# Altium footprint library FootPrintLib_7.PcbLib: 358 footprints (part 19 of 24)
Each footprint in its own frame and in the unit in brackets; x right, y up, seen from the top. Pads: shape width x height; smd on the part's side, far side on the other; paste and mask are expansions set on the pad; w line width, h text height; cw(c..) or ccw(c..) is an arc to the next point about the centre after c.
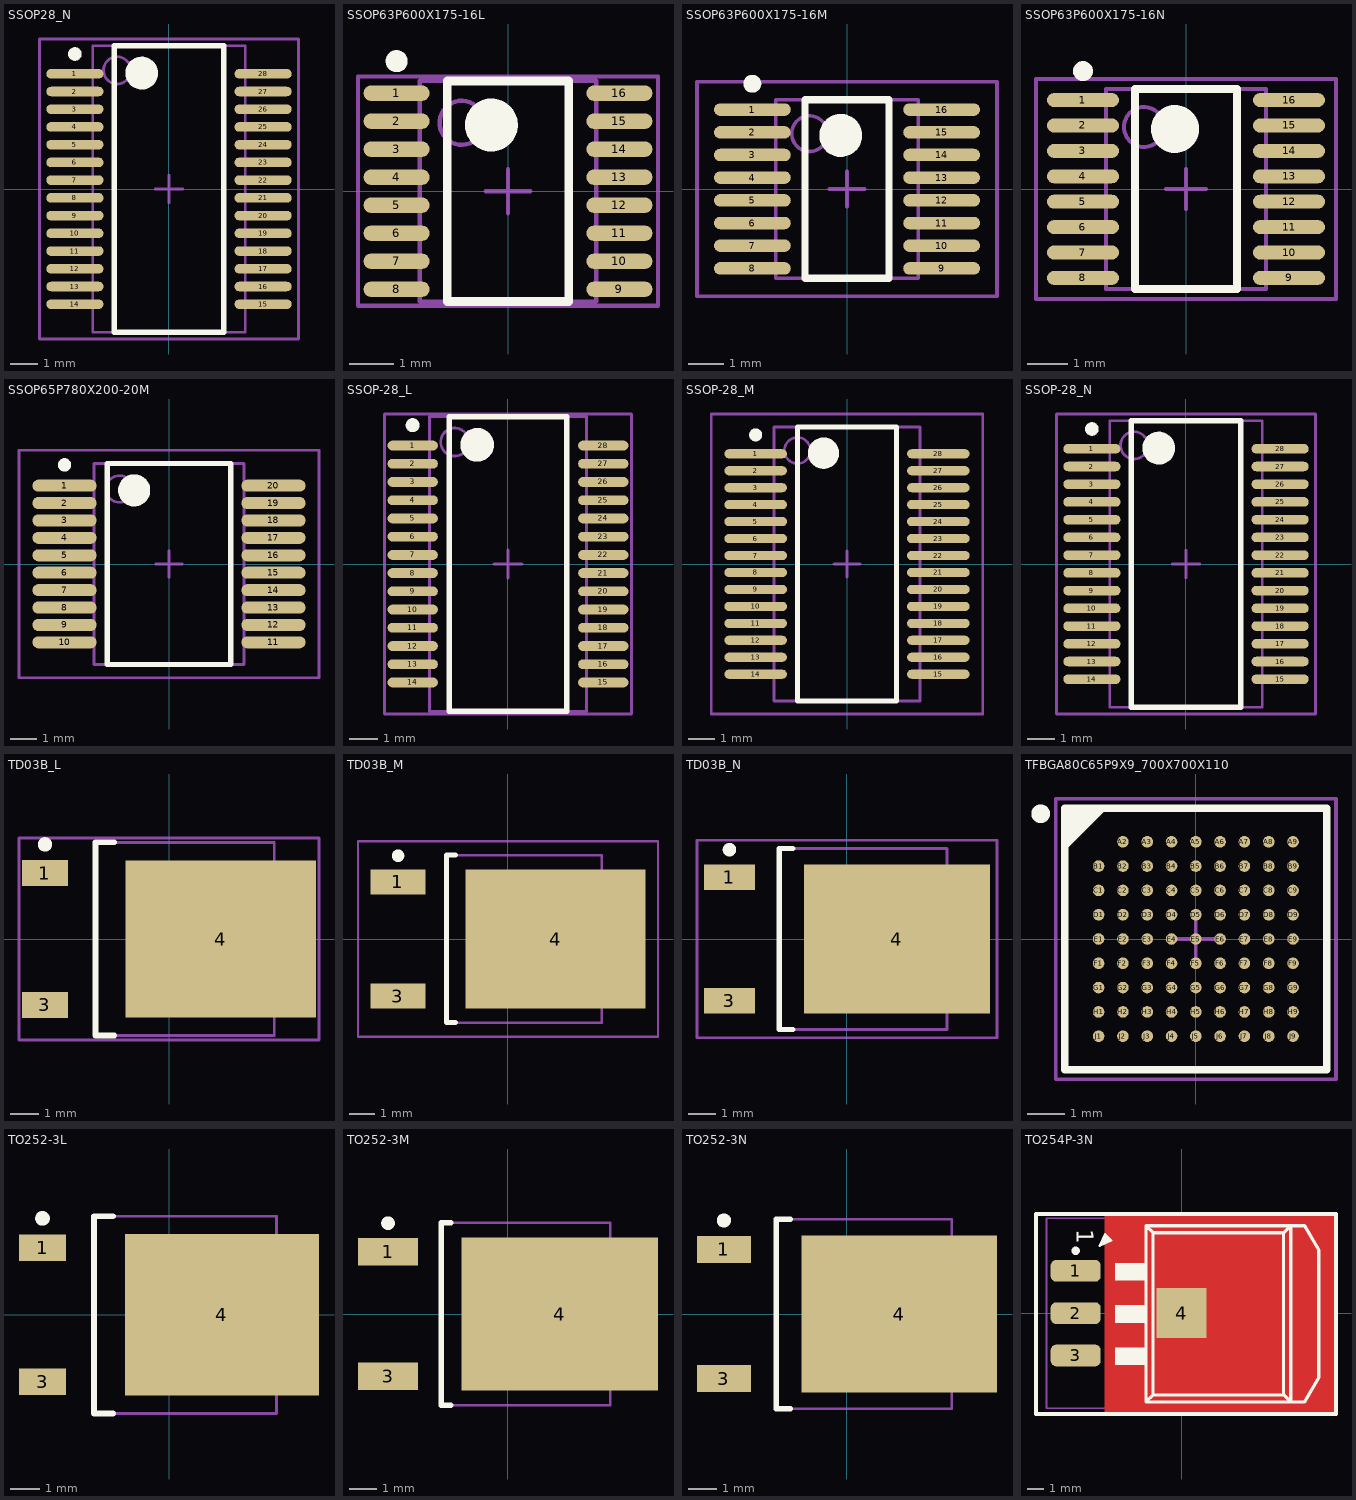
[diagram p18: the footprints below, top view; thin cyan lines are the x and y axes]

## SSOP28_N [mm] "SSOP, 28-Leads, Body 10.2x5.3mm, Pitch 0.65mm, IPC Medium Density"
height 2
pads (28):
  oval 2.1x0.35 smd: 1(-3.45,4.225) 2(-3.45,3.575) 3(-3.45,2.925) 4(-3.45,2.275) 5(-3.45,1.625) 6(-3.45,0.975) 7(-3.45,0.325) 8(-3.45,-0.325) 9(-3.45,-0.975) 10(-3.45,-1.625) 11(-3.45,-2.275) 12(-3.45,-2.925) 13(-3.45,-3.575) 14(-3.45,-4.225) 15(3.45,-4.225) 16(3.45,-3.575) 17(3.45,-2.925) 18(3.45,-2.275) 19(3.45,-1.625) 20(3.45,-0.975) 21(3.45,-0.325) 22(3.45,0.325) 23(3.45,0.975) 24(3.45,1.625) 25(3.45,2.275) 26(3.45,2.925) 27(3.45,3.575) 28(3.45,4.225)
Top Overlay:
  circle w0.6: c-1,4.25 r0.3
  circle w0.25: c-3.45,4.95 r0.125
  lines w0.2: -2,-5.25 2,-5.25 2,5.25 -2,5.25 -2,-5.25
Mechanical 13:
  circle w0.1: c-1.9,4.35 r0.5
  lines w0.1: -2.8,-5.25 2.8,-5.25 2.8,5.25 -2.8,5.25 -2.8,-5.25
Mechanical 15:
  lines w0.1: -0.5,0 0.5,0 ; 0,-0.5 0,0.5 ; -4.75,-5.5 4.75,-5.5 4.75,5.5 -4.75,5.5 -4.75,-5.5
3D body "User Library-SSOP-28-FT232RL.step": height 2.16, standoff 0, extent -3.878,-5.165 3.878,5.165

## SSOP63P600X175-16L [mm] "SSOP, 16-Leads, Body 5.0x4.0mm (max), Pitch 0.63mm, IPC High Density"
height 1.75
pads (16):
  oval 1.5x0.35 smd: 1(-2.525,2.222) 2(-2.525,1.587) 3(-2.525,0.953) 4(-2.525,0.318) 5(-2.525,-0.318) 6(-2.525,-0.953) 7(-2.525,-1.587) 8(-2.525,-2.222) 9(2.525,-2.222) 10(2.525,-1.587) 11(2.525,-0.953) 12(2.525,-0.318) 13(2.525,0.318) 14(2.525,0.953) 15(2.525,1.587) 16(2.525,2.222)
Top Overlay:
  circle w0.25: c-2.525,2.947 r0.125
  circle w0.6: c-0.375,1.5 r0.3
  lines w0.2: -1.375,-2.5 -1.375,2.5 1.375,2.5 1.375,-2.5 -1.375,-2.5
Mechanical 13:
  circle w0.1: c-1.05,1.55 r0.5
  lines w0.1: -2,-2.5 -2,2.5 2,2.5 2,-2.5 -2,-2.5
Mechanical 15:
  lines w0.1: -0.5,0 0.5,0 ; 0,-0.5 0,0.5 ; -3.4,-2.6 -3.4,2.6 3.4,2.6 3.4,-2.6 -3.4,-2.6
3D body: height 1.75, standoff 0.1, extent -2,-2.5 2,2.5

## SSOP63P600X175-16M [mm] "SSOP, 16-Leads, Body 5.0x4.0mm (max), Pitch 0.63mm, IPC Low Density"
height 1.75
pads (16):
  oval 2.15x0.35 smd: 1(-2.65,2.222) 2(-2.65,1.587) 3(-2.65,0.953) 4(-2.65,0.318) 5(-2.65,-0.318) 6(-2.65,-0.953) 7(-2.65,-1.587) 8(-2.65,-2.222) 9(2.65,-2.222) 10(2.65,-1.587) 11(2.65,-0.953) 12(2.65,-0.318) 13(2.65,0.318) 14(2.65,0.953) 15(2.65,1.587) 16(2.65,2.222)
Top Overlay:
  circle w0.6: c-0.175,1.5 r0.3
  circle w0.25: c-2.65,2.947 r0.125
  lines w0.2: -1.175,-2.5 1.175,-2.5 1.175,2.5 -1.175,2.5 -1.175,-2.5
Mechanical 13:
  circle w0.1: c-1.05,1.55 r0.5
  lines w0.1: -2,-2.5 2,-2.5 2,2.5 -2,2.5 -2,-2.5
Mechanical 15:
  lines w0.1: -0.5,0 0.5,0 ; 0,-0.5 0,0.5 ; -4.2,-3 4.2,-3 4.2,3 -4.2,3 -4.2,-3
3D body: height 1.75, standoff 0.1, extent -2,-2.5 2,2.5

## SSOP63P600X175-16N [mm] "SSOP, 16-Leads, Body 5.0x4.0mm (max), Pitch 0.63mm, IPC Medium Density"
height 1.75
pads (16):
  oval 1.8x0.35 smd: 1(-2.575,2.222) 2(-2.575,1.587) 3(-2.575,0.953) 4(-2.575,0.318) 5(-2.575,-0.318) 6(-2.575,-0.953) 7(-2.575,-1.587) 8(-2.575,-2.222) 9(2.575,-2.222) 10(2.575,-1.587) 11(2.575,-0.953) 12(2.575,-0.318) 13(2.575,0.318) 14(2.575,0.953) 15(2.575,1.587) 16(2.575,2.222)
Top Overlay:
  circle w0.6: c-0.275,1.5 r0.3
  circle w0.25: c-2.575,2.947 r0.125
  lines w0.2: -1.275,-2.5 1.275,-2.5 1.275,2.5 -1.275,2.5 -1.275,-2.5
Mechanical 13:
  circle w0.1: c-1.05,1.55 r0.5
  lines w0.1: -2,-2.5 2,-2.5 2,2.5 -2,2.5 -2,-2.5
Mechanical 15:
  lines w0.1: -0.5,0 0.5,0 ; 0,-0.5 0,0.5 ; -3.75,-2.75 3.75,-2.75 3.75,2.75 -3.75,2.75 -3.75,-2.75
3D body: height 1.75, standoff 0.1, extent -2,-2.5 2,2.5

## SSOP65P780X200-20M [mm] "SOP, 20-Leads, Body 7.5x5.6mm (max), Pitch 0.65mm, IPC Low Density"
height 2
pads (20):
  oval 2.4x0.45 smd: 1(-3.9,2.925) 2(-3.9,2.275) 3(-3.9,1.625) 4(-3.9,0.975) 5(-3.9,0.325) 6(-3.9,-0.325) 7(-3.9,-0.975) 8(-3.9,-1.625) 9(-3.9,-2.275) 10(-3.9,-2.925) 11(3.9,-2.925) 12(3.9,-2.275) 13(3.9,-1.625) 14(3.9,-0.975) 15(3.9,-0.325) 16(3.9,0.325) 17(3.9,0.975) 18(3.9,1.625) 19(3.9,2.275) 20(3.9,2.925)
Top Overlay:
  circle w0.6: c-1.3,2.75 r0.3
  circle w0.25: c-3.9,3.7 r0.125
  lines w0.2: -2.3,-3.75 2.3,-3.75 2.3,3.75 -2.3,3.75 -2.3,-3.75
Mechanical 13:
  circle w0.1: c-1.85,2.8 r0.5
  lines w0.1: -2.8,-3.75 2.8,-3.75 2.8,3.75 -2.8,3.75 -2.8,-3.75
Mechanical 15:
  lines w0.1: -0.5,0 0.5,0 ; 0,-0.5 0,0.5 ; -5.6,-4.25 5.6,-4.25 5.6,4.25 -5.6,4.25 -5.6,-4.25
3D body "User Library-SSOP 20 PIN.step": height 1.93, standoff -0.06, extent -3.95,-3.25 3.95,3.25

## SSOP-28_L [mm] "SOP, 28-Leads, Body 10.2x5.3mm, Pitch 0.65mm, IPC High Density"
height 2
pads (28):
  oval 1.8x0.35 smd: 1(-3.4,4.225) 2(-3.4,3.575) 3(-3.4,2.925) 4(-3.4,2.275) 5(-3.4,1.625) 6(-3.4,0.975) 7(-3.4,0.325) 8(-3.4,-0.325) 9(-3.4,-0.975) 10(-3.4,-1.625) 11(-3.4,-2.275) 12(-3.4,-2.925) 13(-3.4,-3.575) 14(-3.4,-4.225) 15(3.4,-4.225) 16(3.4,-3.575) 17(3.4,-2.925) 18(3.4,-2.275) 19(3.4,-1.625) 20(3.4,-0.975) 21(3.4,-0.325) 22(3.4,0.325) 23(3.4,0.975) 24(3.4,1.625) 25(3.4,2.275) 26(3.4,2.925) 27(3.4,3.575) 28(3.4,4.225)
Top Overlay:
  circle w0.25: c-3.4,4.95 r0.125
  circle w0.6: c-1.1,4.25 r0.3
  lines w0.2: -2.1,-5.25 -2.1,5.25 2.1,5.25 2.1,-5.25 -2.1,-5.25
Mechanical 13:
  circle w0.1: c-1.9,4.35 r0.5
  lines w0.1: -2.8,-5.25 -2.8,5.25 2.8,5.25 2.8,-5.25 -2.8,-5.25
Mechanical 15:
  lines w0.1: -0.5,0 0.5,0 ; 0,-0.5 0,0.5 ; -4.4,-5.35 -4.4,5.35 4.4,5.35 4.4,-5.35 -4.4,-5.35
3D body "User Library-SSOP-28-FT232RL.step": height 2.16, standoff 0, extent -3.878,-5.165 3.878,5.165

## SSOP-28_M [mm] "SOP, 28-Leads, Body 10.2x5.3mm, Pitch 0.65mm, IPC Low Density"
height 2
pads (28):
  oval 2.4x0.35 smd: 1(-3.5,4.225) 2(-3.5,3.575) 3(-3.5,2.925) 4(-3.5,2.275) 5(-3.5,1.625) 6(-3.5,0.975) 7(-3.5,0.325) 8(-3.5,-0.325) 9(-3.5,-0.975) 10(-3.5,-1.625) 11(-3.5,-2.275) 12(-3.5,-2.925) 13(-3.5,-3.575) 14(-3.5,-4.225) 15(3.5,-4.225) 16(3.5,-3.575) 17(3.5,-2.925) 18(3.5,-2.275) 19(3.5,-1.625) 20(3.5,-0.975) 21(3.5,-0.325) 22(3.5,0.325) 23(3.5,0.975) 24(3.5,1.625) 25(3.5,2.275) 26(3.5,2.925) 27(3.5,3.575) 28(3.5,4.225)
Top Overlay:
  circle w0.25: c-3.5,4.95 r0.125
  circle w0.6: c-0.9,4.25 r0.3
  lines w0.2: -1.9,-5.25 -1.9,5.25 1.9,5.25 1.9,-5.25 -1.9,-5.25
Mechanical 13:
  circle w0.1: c-1.9,4.35 r0.5
  lines w0.1: -2.8,-5.25 -2.8,5.25 2.8,5.25 2.8,-5.25 -2.8,-5.25
Mechanical 15:
  lines w0.1: -0.5,0 0.5,0 ; 0,-0.5 0,0.5 ; -5.2,-5.75 -5.2,5.75 5.2,5.75 5.2,-5.75 -5.2,-5.75
3D body "User Library-SSOP-28-FT232RL.step": height 2.16, standoff 0, extent -3.878,-5.165 3.878,5.165

## SSOP-28_N [mm] "SOP, 28-Leads, Body 10.2x5.3mm, Pitch 0.65mm, IPC Medium Density"
height 2
pads (28):
  oval 2.1x0.35 smd: 1(-3.45,4.225) 2(-3.45,3.575) 3(-3.45,2.925) 4(-3.45,2.275) 5(-3.45,1.625) 6(-3.45,0.975) 7(-3.45,0.325) 8(-3.45,-0.325) 9(-3.45,-0.975) 10(-3.45,-1.625) 11(-3.45,-2.275) 12(-3.45,-2.925) 13(-3.45,-3.575) 14(-3.45,-4.225) 15(3.45,-4.225) 16(3.45,-3.575) 17(3.45,-2.925) 18(3.45,-2.275) 19(3.45,-1.625) 20(3.45,-0.975) 21(3.45,-0.325) 22(3.45,0.325) 23(3.45,0.975) 24(3.45,1.625) 25(3.45,2.275) 26(3.45,2.925) 27(3.45,3.575) 28(3.45,4.225)
Top Overlay:
  circle w0.6: c-1,4.25 r0.3
  circle w0.25: c-3.45,4.95 r0.125
  lines w0.2: -2,-5.25 2,-5.25 2,5.25 -2,5.25 -2,-5.25
Mechanical 13:
  circle w0.1: c-1.9,4.35 r0.5
  lines w0.1: -2.8,-5.25 2.8,-5.25 2.8,5.25 -2.8,5.25 -2.8,-5.25
Mechanical 15:
  lines w0.1: -0.5,0 0.5,0 ; 0,-0.5 0,0.5 ; -4.75,-5.5 4.75,-5.5 4.75,5.5 -4.75,5.5 -4.75,-5.5
3D body "User Library-SSOP-28-FT232RL.step": height 2.16, standoff 0, extent -3.878,-5.165 3.878,5.165

## TD03B_L [mm] "D-PAK, 4-Leads, Body 6.1x6.6mm, Pitch 2.29mm, Lead Span 9.7mm, IPC High Density"
height 2.38
pads (3):
  rect 1.6x0.9 smd: 1(-4.3,2.28) 3(-4.3,-2.28)
  rect 6.6x5.45 smd: 4(1.8,0)
Top Overlay:
  circle w0.25: c-4.3,3.28 r0.125
  lines w0.2: -1.9,-3.35 -2.55,-3.35 -2.55,3.35 -1.9,3.35
Mechanical 13:
  lines w0.1: -2.55,-3.35 3.65,-3.35 3.65,3.35 -2.55,3.35 -2.55,-3.35
Mechanical 15:
  lines w0.1: -0.5,0 0.5,0 ; 0,-0.5 0,0.5 ; -5.2,-3.5 5.2,-3.5 5.2,3.5 -5.2,3.5 -5.2,-3.5
3D body "DPAK.STEP": height 2.34, standoff -0.07, extent -5.176,-3.27 4.762,3.27

## TD03B_M [mm] "D-PAK, 4-Leads, Body 6.1x6.6mm, Pitch 2.29mm, Lead Span 9.7mm, IPC Low Density"
height 2.38
pads (3):
  rect 2.2x1 smd: 1(-4.4,2.28) 3(-4.4,-2.28)
  rect 7.2x5.55 smd: 4(1.9,0)
Top Overlay:
  circle w0.25: c-4.4,3.33 r0.125
  lines w0.2: -2.1,-3.35 -2.45,-3.35 -2.45,3.35 -2.1,3.35
Mechanical 13:
  lines w0.1: -2.45,-3.35 3.75,-3.35 3.75,3.35 -2.45,3.35 -2.45,-3.35
Mechanical 15:
  lines w0.1: -0.5,0 0.5,0 ; 0,-0.5 0,0.5 ; -6,-3.9 6,-3.9 6,3.9 -6,3.9 -6,-3.9
3D body "DPAK.STEP": height 2.34, standoff -0.07, extent -5.176,-3.27 4.762,3.27

## TD03B_N [mm] "D-PAK, 4-Leads, Body 6.1x6.6mm, Pitch 2.29mm, Lead Span 9.7mm, IPC Medium Density"
height 2.38
pads (3):
  rect 1.9x0.95 smd: 1(-4.35,2.28) 3(-4.35,-2.28)
  rect 6.9x5.5 smd: 4(1.85,0)
Top Overlay:
  circle w0.25: c-4.35,3.305 r0.125
  lines w0.2: -2,-3.35 -2.5,-3.35 -2.5,3.35 -2,3.35
Mechanical 13:
  lines w0.1: -2.5,-3.35 3.7,-3.35 3.7,3.35 -2.5,3.35 -2.5,-3.35
Mechanical 15:
  lines w0.1: -0.5,0 0.5,0 ; 0,-0.5 0,0.5 ; -5.55,-3.65 5.55,-3.65 5.55,3.65 -5.55,3.65 -5.55,-3.65
3D body "DPAK.STEP": height 2.34, standoff -0.07, extent -5.176,-3.27 4.762,3.27

## TFBGA80C65P9X9_700X700X110 [mm] "TFBGA, 80-Leads, Body 7.0x7.0mm,  Pitch 0.65mm"
height 1.1
pads (80):
  round 0.31 smd: A2(-1.95,2.6) A3(-1.3,2.6) A4(-0.65,2.6) A5(0,2.6) A6(0.65,2.6) A7(1.3,2.6) A8(1.95,2.6) A9(2.6,2.6) B1(-2.6,1.95) B2(-1.95,1.95) B3(-1.3,1.95) B4(-0.65,1.95) B5(0,1.95) B6(0.65,1.95) B7(1.3,1.95) B8(1.95,1.95) B9(2.6,1.95) C1(-2.6,1.3) C2(-1.95,1.3) C3(-1.3,1.3) C4(-0.65,1.3) C5(0,1.3) C6(0.65,1.3) C7(1.3,1.3) C8(1.95,1.3) C9(2.6,1.3) D1(-2.6,0.65) D2(-1.95,0.65) D3(-1.3,0.65) D4(-0.65,0.65) D5(0,0.65) D6(0.65,0.65) D7(1.3,0.65) D8(1.95,0.65) D9(2.6,0.65) E1(-2.6,0) E2(-1.95,0) E3(-1.3,0) E4(-0.65,0) E5(0,0) E6(0.65,0) E7(1.3,0) E8(1.95,0) E9(2.6,0) F1(-2.6,-0.65) F2(-1.95,-0.65) F3(-1.3,-0.65) F4(-0.65,-0.65) F5(0,-0.65) F6(0.65,-0.65) F7(1.3,-0.65) F8(1.95,-0.65) F9(2.6,-0.65) G1(-2.6,-1.3) G2(-1.95,-1.3) G3(-1.3,-1.3) G4(-0.65,-1.3) G5(0,-1.3) G6(0.65,-1.3) G7(1.3,-1.3) G8(1.95,-1.3) G9(2.6,-1.3) H1(-2.6,-1.95) H2(-1.95,-1.95) H3(-1.3,-1.95) H4(-0.65,-1.95) H5(0,-1.95) H6(0.65,-1.95) H7(1.3,-1.95) H8(1.95,-1.95) H9(2.6,-1.95) J1(-2.6,-2.6) J2(-1.95,-2.6) J3(-1.3,-2.6) J4(-0.65,-2.6) J5(0,-2.6) J6(0.65,-2.6) J7(1.3,-2.6) J8(1.95,-2.6) J9(2.6,-2.6)
Top Overlay:
  circle w0.25: c-4.15,3.35 r0.125
  region: -2.5,3.5 -3.5,2.5 -3.5,3.5
  lines w0.2: -3.5,2.5 -2.5,3.5 ; -3.5,-3.5 -3.5,3.5 3.5,3.5 3.5,-3.5 -3.5,-3.5
Mechanical 13:
  lines w0.1: -3.5,-3.5 -3.5,3.5 3.5,3.5 3.5,-3.5 -3.5,-3.5
Mechanical 15:
  lines w0.1: -0.5,0 0.5,0 ; 0,-0.5 0,0.5 ; -3.75,-3.75 -3.75,3.75 3.75,3.75 3.75,-3.75 -3.75,-3.75
3D body: height 1.1, standoff 0.26, extent -3.5,-3.5 3.5,3.5
3D body: height 1.11, standoff 1.1, extent -2.965,2.368 -2.367,2.966
3D body: height 0.54, standoff 0, extent -2.867,-2.869 -2.33,-2.331
3D body: height 0.54, standoff 0, extent -2.867,-2.219 -2.33,-1.681
3D body: height 0.54, standoff 0, extent -2.867,-1.569 -2.33,-1.031
3D body: height 0.54, standoff 0, extent -2.867,-0.919 -2.33,-0.381
3D body: height 0.54, standoff 0, extent -2.867,-0.269 -2.33,0.269
3D body: height 0.54, standoff 0, extent -2.867,0.381 -2.33,0.919
3D body: height 0.54, standoff 0, extent -2.867,1.031 -2.33,1.569
3D body: height 0.54, standoff 0, extent -2.867,1.681 -2.33,2.219
3D body: height 0.54, standoff 0, extent -2.217,-2.869 -1.68,-2.331
3D body: height 0.54, standoff 0, extent -2.217,-2.219 -1.68,-1.681
3D body: height 0.54, standoff 0, extent -2.217,-1.569 -1.68,-1.031
3D body: height 0.54, standoff 0, extent -2.217,-0.919 -1.68,-0.381
3D body: height 0.54, standoff 0, extent -2.217,-0.269 -1.68,0.269
3D body: height 0.54, standoff 0, extent -2.217,0.381 -1.68,0.919
3D body: height 0.54, standoff 0, extent -2.217,1.031 -1.68,1.569
3D body: height 0.54, standoff 0, extent -2.217,1.681 -1.68,2.219
3D body: height 0.54, standoff 0, extent -2.217,2.331 -1.68,2.869
3D body: height 0.54, standoff 0, extent -1.567,-2.869 -1.03,-2.331
3D body: height 0.54, standoff 0, extent -1.567,-2.219 -1.03,-1.681
3D body: height 0.54, standoff 0, extent -1.567,-1.569 -1.03,-1.031
3D body: height 0.54, standoff 0, extent -1.567,-0.919 -1.03,-0.381
3D body: height 0.54, standoff 0, extent -1.567,-0.269 -1.03,0.269
3D body: height 0.54, standoff 0, extent -1.567,0.381 -1.03,0.919
3D body: height 0.54, standoff 0, extent -1.567,1.031 -1.03,1.569
3D body: height 0.54, standoff 0, extent -1.567,1.681 -1.03,2.219
3D body: height 0.54, standoff 0, extent -1.567,2.331 -1.03,2.869
3D body: height 0.54, standoff 0, extent -0.917,-2.869 -0.38,-2.331
3D body: height 0.54, standoff 0, extent -0.917,-2.219 -0.38,-1.681
3D body: height 0.54, standoff 0, extent -0.917,-1.569 -0.38,-1.031
3D body: height 0.54, standoff 0, extent -0.917,-0.919 -0.38,-0.381
3D body: height 0.54, standoff 0, extent -0.917,-0.269 -0.38,0.269
3D body: height 0.54, standoff 0, extent -0.917,0.381 -0.38,0.919
3D body: height 0.54, standoff 0, extent -0.917,1.031 -0.38,1.569
3D body: height 0.54, standoff 0, extent -0.917,1.681 -0.38,2.219
3D body: height 0.54, standoff 0, extent -0.917,2.331 -0.38,2.869
3D body: height 0.54, standoff 0, extent -0.267,-2.869 0.27,-2.331
3D body: height 0.54, standoff 0, extent -0.267,-2.219 0.27,-1.681
3D body: height 0.54, standoff 0, extent -0.267,-1.569 0.27,-1.031
3D body: height 0.54, standoff 0, extent -0.267,-0.919 0.27,-0.381
3D body: height 0.54, standoff 0, extent -0.267,-0.269 0.27,0.269
3D body: height 0.54, standoff 0, extent -0.267,0.381 0.27,0.919
3D body: height 0.54, standoff 0, extent -0.267,1.031 0.27,1.569
3D body: height 0.54, standoff 0, extent -0.267,1.681 0.27,2.219
3D body: height 0.54, standoff 0, extent -0.267,2.331 0.27,2.869
3D body: height 0.54, standoff 0, extent 0.383,-2.869 0.92,-2.331
3D body: height 0.54, standoff 0, extent 0.383,-2.219 0.92,-1.681
3D body: height 0.54, standoff 0, extent 0.383,-1.569 0.92,-1.031
3D body: height 0.54, standoff 0, extent 0.383,-0.919 0.92,-0.381
3D body: height 0.54, standoff 0, extent 0.383,-0.269 0.92,0.269
3D body: height 0.54, standoff 0, extent 0.383,0.381 0.92,0.919
3D body: height 0.54, standoff 0, extent 0.383,1.031 0.92,1.569
3D body: height 0.54, standoff 0, extent 0.383,1.681 0.92,2.219
3D body: height 0.54, standoff 0, extent 0.383,2.331 0.92,2.869
3D body: height 0.54, standoff 0, extent 1.033,-2.869 1.57,-2.331
3D body: height 0.54, standoff 0, extent 1.033,-2.219 1.57,-1.681
3D body: height 0.54, standoff 0, extent 1.033,-1.569 1.57,-1.031
3D body: height 0.54, standoff 0, extent 1.033,-0.919 1.57,-0.381
3D body: height 0.54, standoff 0, extent 1.033,-0.269 1.57,0.269
3D body: height 0.54, standoff 0, extent 1.033,0.381 1.57,0.919
3D body: height 0.54, standoff 0, extent 1.033,1.031 1.57,1.569
3D body: height 0.54, standoff 0, extent 1.033,1.681 1.57,2.219
3D body: height 0.54, standoff 0, extent 1.033,2.331 1.57,2.869
3D body: height 0.54, standoff 0, extent 1.683,-2.869 2.22,-2.331
3D body: height 0.54, standoff 0, extent 1.683,-2.219 2.22,-1.681
3D body: height 0.54, standoff 0, extent 1.683,-1.569 2.22,-1.031
3D body: height 0.54, standoff 0, extent 1.683,-0.919 2.22,-0.381
3D body: height 0.54, standoff 0, extent 1.683,-0.269 2.22,0.269
3D body: height 0.54, standoff 0, extent 1.683,0.381 2.22,0.919
3D body: height 0.54, standoff 0, extent 1.683,1.031 2.22,1.569
3D body: height 0.54, standoff 0, extent 1.683,1.681 2.22,2.219
3D body: height 0.54, standoff 0, extent 1.683,2.331 2.22,2.869
3D body: height 0.54, standoff 0, extent 2.333,-2.869 2.87,-2.331
3D body: height 0.54, standoff 0, extent 2.333,-2.219 2.87,-1.681
3D body: height 0.54, standoff 0, extent 2.333,-1.569 2.87,-1.031
3D body: height 0.54, standoff 0, extent 2.333,-0.919 2.87,-0.381
3D body: height 0.54, standoff 0, extent 2.333,-0.269 2.87,0.269
3D body: height 0.54, standoff 0, extent 2.333,0.381 2.87,0.919
3D body: height 0.54, standoff 0, extent 2.333,1.031 2.87,1.569
3D body: height 0.54, standoff 0, extent 2.333,1.681 2.87,2.219
3D body: height 0.54, standoff 0, extent 2.333,2.331 2.87,2.869

## TO252-3L [mm] "D-PAK, 3-Pads, Body 6.2x6.7mm (max), IPC High Density"
height 2.38
pads (3):
  rect 1.6x0.9 smd: 1(-4.3,2.28) 3(-4.3,-2.28)
  rect 6.6x5.5 smd: 4(1.8,0)
Top Overlay:
  circle w0.25: c-4.3,3.28 r0.125
  lines w0.2: -1.9,-3.35 -2.55,-3.35 -2.55,3.35 -1.9,3.35
Mechanical 13:
  lines w0.1: -2.55,-3.35 -2.55,3.35 3.65,3.35 3.65,-3.35 -2.55,-3.35
Mechanical 15:
  lines w0.1: -0.5,0 0.5,0 ; 0,-0.5 0,0.5
3D body "User Library-DPAK-1.step": height 2.39, standoff -0.02, extent -5.061,-3.27 4.878,3.27

## TO252-3M [mm] "D-PAK, 3-Pads, Body 6.2x6.7mm (max), IPC Low Density"
height 2.38
pads (3):
  rect 2.2x1 smd: 1(-4.4,2.28) 3(-4.4,-2.28)
  rect 7.2x5.6 smd: 4(1.9,0)
Top Overlay:
  circle w0.25: c-4.4,3.33 r0.125
  lines w0.2: -2.1,-3.35 -2.45,-3.35 -2.45,3.35 -2.1,3.35
Mechanical 13:
  lines w0.1: -2.45,-3.35 3.75,-3.35 3.75,3.35 -2.45,3.35 -2.45,-3.35
Mechanical 15:
  lines w0.1: -0.5,0 0.5,0 ; 0,-0.5 0,0.5
3D body "User Library-DPAK-1.step": height 2.39, standoff -0.02, extent -5.061,-3.27 4.878,3.27

## TO252-3N [mm] "D-PAK, 3-Pads, Body 6.2x6.7mm (max), IPC Medium Density"
height 2.38
pads (3):
  rect 1.9x0.95 smd: 1(-4.35,2.28) 3(-4.35,-2.28)
  rect 6.9x5.55 smd: 4(1.85,0)
Top Overlay:
  circle w0.25: c-4.35,3.305 r0.125
  lines w0.2: -2,-3.35 -2.5,-3.35 -2.5,3.35 -2,3.35
Mechanical 13:
  lines w0.1: -2.5,-3.35 3.7,-3.35 3.7,3.35 -2.5,3.35 -2.5,-3.35
Mechanical 15:
  lines w0.1: -0.5,0 0.5,0 ; 0,-0.5 0,0.5
3D body "User Library-DPAK-1.step": height 2.39, standoff -0.02, extent -5.061,-3.27 4.878,3.27

## TO254P-3N [mm]
pads (4):
  rrect50% 3x1.3 smd: 1(-6.35,2.54) 2(-6.35,0) 3(-6.35,-2.54)
  rect 3x3 smd: 4(0,0)
Top Layer:
  region: -4.634,5.949 -4.634,-6.051 9.258,-6.051 9.258,5.949
Top Overlay:
  circle w0.25: c-6.35,3.742 r0.125
  region: -3.988,0.483 -3.988,-0.584 -2.108,-0.584 -2.108,0.483
  region: -3.988,-2.057 -3.988,-3.124 -2.108,-3.124 -2.108,-2.057
  region: -3.988,3.022 -3.988,1.956 -2.108,1.956 -2.108,3.022
  lines w0.127: -4.919,4.028 -4.4,4.547 ; -4.919,4.028 -4.589,4.739 -4.4,4.547 ; -4.919,4.028 -4.208,4.358 -4.4,4.547
  lines w0.178: -4.716,4.383 -4.538,4.561 ; -4.564,4.231 -4.386,4.409
  lines w0.2: -2.134,-5.329 -1.71,-4.906 ; -2.134,-5.329 6.545,-5.329 ; -2.134,-5.329 -2.134,5.254 ; -2.134,5.254 -1.71,4.831 ; -2.134,5.254 6.545,5.254 ; -1.71,-4.906 -1.71,4.831 ; -1.71,-4.906 6.121,-4.906 ; -1.71,4.831 6.121,4.831 ; 6.121,-4.906 6.545,-5.329 ; 6.121,-4.906 6.121,4.831 ; 6.121,4.831 6.545,5.254 ; 6.545,-5.329 7.366,-5.329 8.238,-3.847 8.238,3.773 7.366,5.254 6.545,5.254 ; 6.545,-5.329 6.545,5.254
  lines w0.254: -8.731,-6.051 -8.731,5.949 9.269,5.949 9.269,-6.051 -8.731,-6.051
  text "1" at -6.299,5.026 h1
Top Paste:
  region: -0.431,3.773 -0.431,-3.847 7.595,-3.847 7.595,3.773
Top Solder:
  region: -2.413,5.505 -2.413,-5.621 8.179,-5.621 8.179,5.505
  lines w0.254: 8.554,-3.938 8.131,-5.419 ; 8.554,3.863 8.131,5.344 ; -2.462,-5.329 ccw(c-2.134,-5.329) -2.134,-5.658 ; -2.462,-5.329 ccw(c-2.134,-5.329) -2.134,-5.658 ; -2.462,-5.329 -2.462,5.254 ; -2.462,5.254 cw(c-2.134,5.254) -2.134,5.583 ; -2.462,5.254 cw(c-2.134,5.254) -2.134,5.583 ; -2.134,-5.658 6.545,-5.658 7.815,-5.658 ; -2.134,5.583 6.545,5.583 7.815,5.583 ; 7.815,-5.658 ccw(c7.815,-5.329) 8.131,-5.42 ; 7.815,-5.658 ccw(c7.815,-5.329) 8.131,-5.42 ; 7.815,5.583 cw(c7.815,5.254) 8.131,5.345 ; 7.815,5.583 cw(c7.815,5.254) 8.131,5.345 ; 8.567,-3.847 cw(c8.238,-3.847) 8.554,-3.938 ccw(c8.238,-3.847) 8.567,-3.847 ; 8.567,-3.847 8.567,3.773 ; 8.567,3.773 ccw(c8.238,3.773) 8.554,3.863 cw(c8.238,3.773) 8.567,3.773
  lines w0.508: 8.196,-4.669 8.196,4.577
Mechanical 13:
  lines w0.1: -2.675,-4.985 6.475,-4.985 6.475,4.985 -2.675,4.985 -2.675,-4.985
Mechanical 15:
  lines w0.1: -0.5,0 0.5,0 ; 0,-0.5 0,0.5 ; -8.1,-5.7 8.1,-5.7 8.1,5.7 -8.1,5.7 -8.1,-5.7
3D body "254-3.STEP": height 2.53, standoff -0.02, extent -7.339,-5.087 8.101,5.08